# Altium footprint library PcbLib1.PcbLib: 24 footprints (part 1 of 2)
Each footprint in its own frame and in the unit in brackets; x right, y up, seen from the top. Pads: shape width x height; smd on the part's side, far side on the other; paste and mask are expansions set on the pad; w line width, h text height; cw(c..) or ccw(c..) is an arc to the next point about the centre after c.
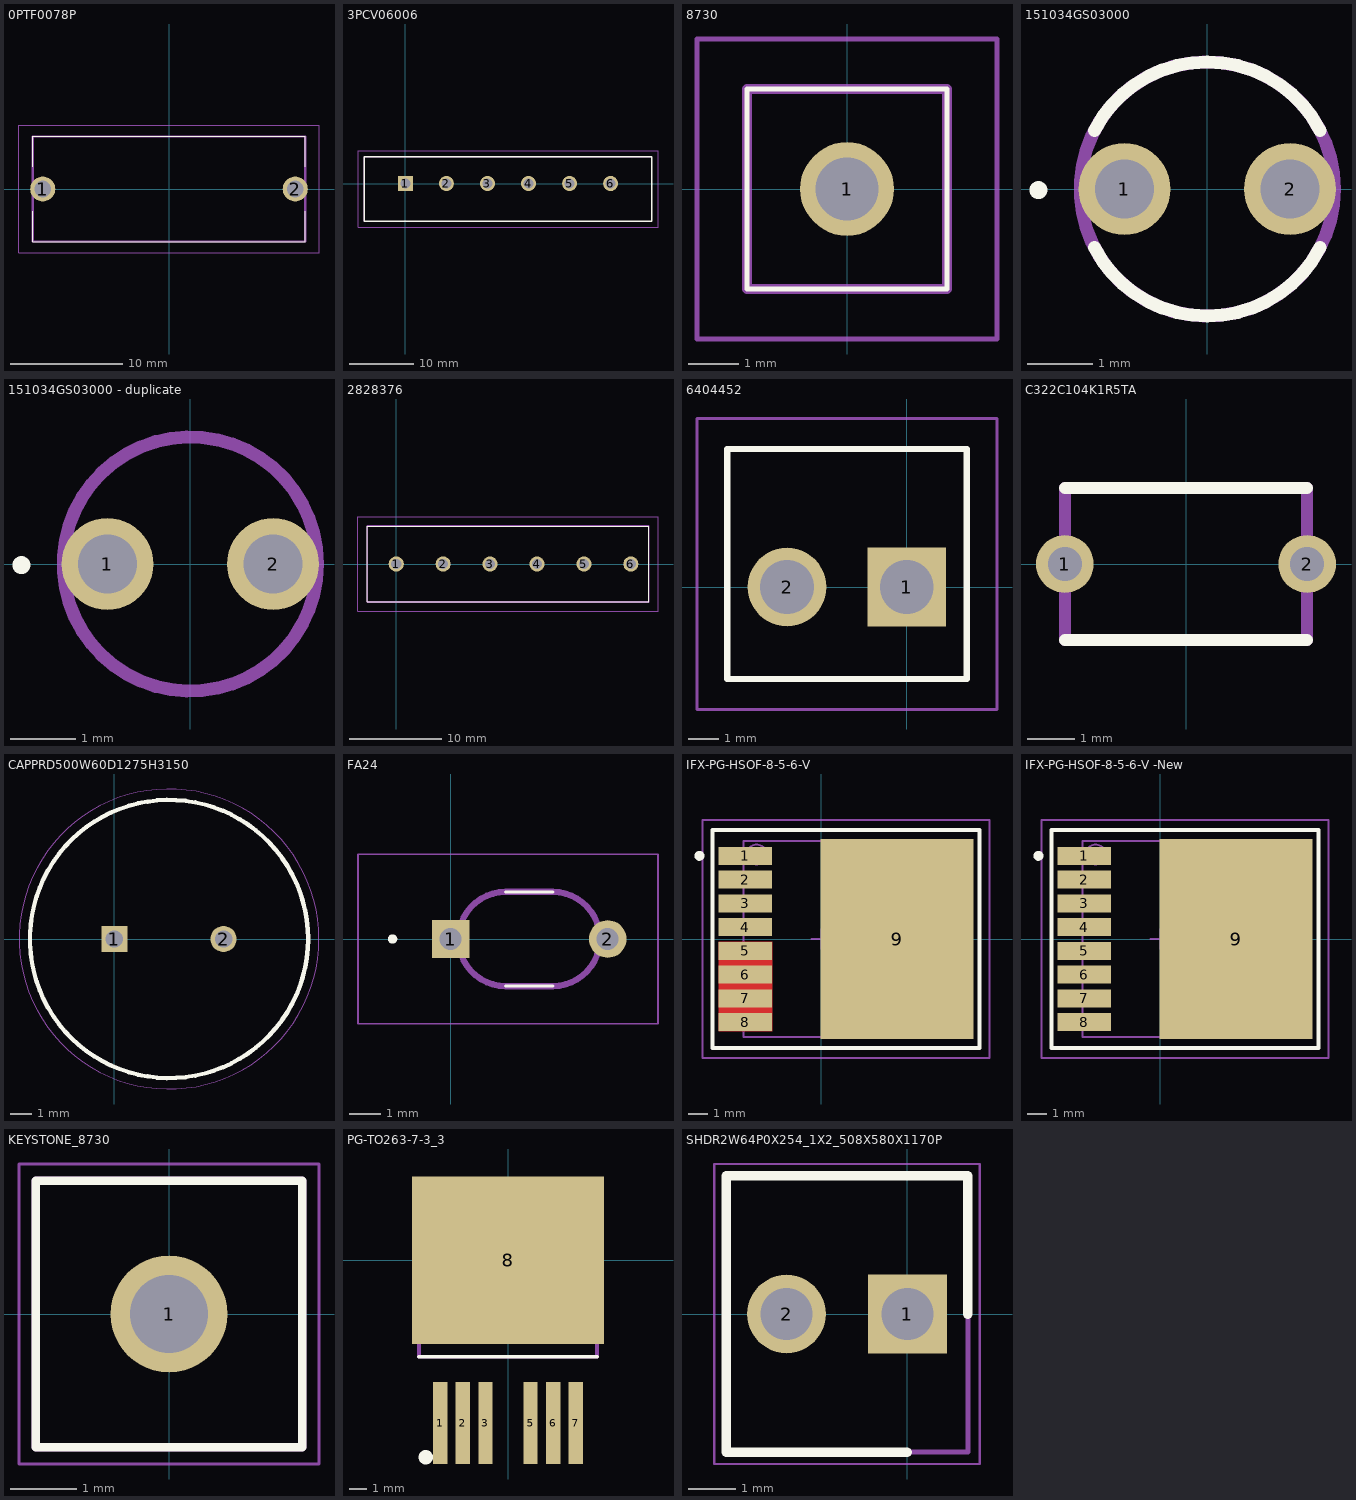
[diagram p0: the footprints below, top view; thin cyan lines are the x and y axes]

## 0PTF0078P [mm]
pads (2):
  round 2.25 hole 1.5: 1(-11.3,0) 2(11.3,0)
Top Overlay:
  lines w0.1: -12.2,-2 -12.2,-4.7 12.2,-4.7 12.2,-2 ; -12.2,2 -12.2,4.7 12.2,4.7 12.2,2
Mechanical 13:
  lines w0.2: -12.2,-4.7 -12.2,4.7 12.2,4.7 12.2,-4.7 -12.2,-4.7
Mechanical 15:
  lines w0.1: -13.425,-5.7 -13.425,5.7 13.425,5.7 13.425,-5.7 -13.425,-5.7
3D body "0PTF0078P.stp": height 11.45, standoff -3.55, extent -12.2,-4.7 12.2,4.7

## 3PCV06006 [mm]
pads (6):
  rect 2.34x2.34 hole 1.56: 1(0,0)
  round 2.34 hole 1.56: 2(6.35,0) 3(12.7,0) 4(19.05,0) 5(25.4,0) 6(31.75,0)
Top Overlay:
  lines w0.2: -6.325,-5.8 38.075,-5.8 38.075,4.1 -6.325,4.1 -6.325,-5.8
Mechanical 13:
  lines w0.1: -6.325,-5.8 38.075,-5.8 38.075,4.1 -6.325,4.1 -6.325,-5.8
Mechanical 15:
  lines w0.1: -7.325,-6.8 39.075,-6.8 39.075,5.1 -7.325,5.1 -7.325,-6.8
3D body "c-5-1437646-0-h-3d.stp": height 12.7, standoff -4.69, extent -3.81,-10.287 35.306,3.683

## 8730 [mm]
pads (1):
  round 1.875 hole 1.25: 1(0,0)
Top Overlay:
  lines w0.1: -2,-2 2,-2 2,2 -2,2 -2,-2
Mechanical 13:
  lines w0.2: -2,-2 2,-2 2,2 -2,2 -2,-2
Mechanical 15:
  lines w0.1: -3,-3 3,-3 3,3 -3,3 -3,-3
3D body "8730.stp": height 10.83, standoff -4.92, extent -2.002,-1.996 1.998,2.004

## 151034GS03000 [mm]
pads (2):
  round 1.41 hole 0.91: 1(-1.27,0) 2(1.27,0)
Top Overlay:
  circle w0.2: c-2.59,-0.017 r0.037
  lines w0.2: -1.73,-0.9 ccw(c0,0) 1.73,-0.9 ; -1.73,0.9 cw(c0,0) 1.73,0.9
Mechanical 13:
  circle w0.2: c0,0 r1.95
3D body "151031VS06000.stp": height 11.02, standoff -20.68, extent -1.961,-1.975 1.645,1.975

## 151034GS03000 - duplicate [mm]
pads (2):
  round 1.41 hole 0.91: 1(-1.27,0) 2(1.27,0)
Top Overlay:
  circle w0.2: c-2.59,-0.017 r0.037
Mechanical 13:
  circle w0.2: c0,0 r1.95
3D body "151031VS06000.stp": height 11.02, standoff -20.68, extent -1.961,-1.975 1.645,1.975

## 2828376 [mm]
pads (6):
  round 1.65 hole 1.1: 1(0,0) 2(5.08,0) 3(10.16,0) 4(15.24,0) 5(20.32,0) 6(25.4,0)
Top Overlay:
  lines w0.1: -3.14,-4.1 27.34,-4.1 27.34,4.1 -3.14,4.1 -3.14,-4.1
Mechanical 13:
  lines w0.2: -3.14,-4.1 27.34,-4.1 27.34,4.1 -3.14,4.1 -3.14,-4.1
Mechanical 15:
  lines w0.1: -4.14,-5.1 28.34,-5.1 28.34,5.1 -4.14,5.1 -4.14,-5.1
3D body "282837-6.stp": height 10.61, standoff -2.89, extent -3.18,-4.1 27.9,4.1

## 6404452 [mm]
pads (2):
  rect 2.6x2.6 hole 1.778: 1(0,0)
  round 2.6 hole 1.778: 2(-3.962,0)
Top Overlay:
  lines w0.2: -5.939,-3.048 -5.939,4.572 1.981,4.572 1.981,-3.048 -5.939,-3.048
Mechanical 13:
  lines w0.1: -5.939,-3.048 -5.939,4.572 1.981,4.572 1.981,-3.048 -5.939,-3.048
Mechanical 15:
  lines w0.1: -6.939,-4.048 -6.939,5.572 2.981,5.572 2.981,-4.048 -6.939,-4.048
3D body "640445-2.stp": height 13.38, standoff -3.13, extent -5.942,-3.045 1.982,4.575

## C322C104K1R5TA [mm]
pads (2):
  round 1.21 hole 0.71: 1(-2.54,0) 2(2.54,0)
Top Overlay:
  lines w0.254: -2.54,-1.59 2.54,-1.59 ; -2.54,1.59 2.54,1.59
Mechanical 13:
  lines w0.254: -2.54,-1.59 2.54,-1.59 2.54,1.59 -2.54,1.59 -2.54,-1.59
3D body "C322C104M5U5TA.stp": height 6.64, standoff -6.96, extent -2.793,-1.595 2.793,1.59

## CAPPRD500W60D1275H3150 [mm]
pads (2):
  rect 1.2x1.2 hole 0.8: 1(0,0)
  round 1.2 hole 0.8: 2(5,0)
Top Overlay:
  circle w0.2: c2.5,0 r6.375
Mechanical 13:
  circle w0.1: c2.5,0 r6.375
Mechanical 15:
  circle w0.05: c2.5,0 r6.875
3D body "EKZE630ELL471MK30S.stp": height 31.5, standoff -10, extent -4,-6.485 9,6.485

## FA24 [mm]
pads (2):
  rect 1.2x1.2 hole 0.7: 1(0,0)
  round 1.2 hole 0.7: 2(5,0)
Top Overlay:
  circle w0.2: c-1.85,0 r0.05
  lines w0.1: 1.75,-1.5 3.25,-1.5 ; 1.75,1.5 3.25,1.5
Mechanical 13:
  lines w0.2: 1.75,-1.5 cw(c1.75,0) 1.75,1.5 3.25,1.5 cw(c3.25,0) 3.25,-1.5 1.75,-1.5
Mechanical 15:
  lines w0.05: -2.95,-2.7 -2.95,2.7 6.6,2.7 6.6,-2.7 -2.95,-2.7
3D body "FA24X7R1H334KNU06.stp": height 5.96, standoff -6.54, extent -0.23,-1.5 5.27,1.5

## FUSE [mm]
3D body "MIDA.stp": height 4, standoff -4, extent 19.654,6.466 31.654,48.398

## IFX-PG-HSOF-8-5-6-V [mm] "PG-HSOF-8, SMD, 1.2 mm pitch, 9 pin, 10.375 mm L X 9.90 mm W X 2.30 mm H body"
height 2.3
pads (9):
  rect 2.7x0.9 smd paste-0.45 mask-0.05: 1(-3.827,4.2) 2(-3.827,3) 3(-3.827,1.8) 4(-3.827,0.6)
  rect 2.7x0.9 smd paste-1.3 mask-0.45: 5(-3.827,-0.6) 6(-3.827,-1.8) 7(-3.827,-3) 8(-3.827,-4.2)
  rect 7.743x10.1 smd paste-5.05 mask-5.05: 9(3.827,0)
Top Layer:
  region: -5.176,-0.15 -2.476,-0.15 -2.476,-4.65 -5.176,-4.65
Top Overlay:
  circle w0.25: c-6.15,4.2 r0.125
  lines w0.2: -5.5,-5.5 8,-5.5 8,5.5 -5.5,5.5 -5.5,-5.5
Top Paste:
  region: -5.079,-4.55 -5.077,-4.55 -2.579,-4.55 -2.579,-3.85 -5.079,-3.85
  region: -5.079,-0.95 -5.077,-0.95 -2.579,-0.95 -2.579,-0.25 -5.079,-0.25
  region: -5.079,-2.15 -5.077,-2.15 -2.579,-2.15 -2.579,-1.45 -5.079,-1.45
  region: -5.079,-3.35 -5.077,-3.35 -2.579,-3.35 -2.579,-2.65 -5.079,-2.65
  region: -2.877,0.95 -2.877,0.25 -5.077,0.25 -5.077,0.95
  region: -2.877,2.15 -2.877,1.45 -5.077,1.45 -5.077,2.15
  region: -2.877,3.35 -2.877,2.65 -5.077,2.65 -5.077,3.35
  region: -2.877,4.55 -2.877,3.85 -5.077,3.85 -5.077,4.55
  region: 7.528,4.25 7.528,0.25 6.328,0.25 6.328,4.25
  region: 7.528,-0.25 7.528,-4.25 6.328,-4.25 6.328,-0.25
  region: 6.028,3.67 6.028,0.25 4.828,0.25 4.828,3.67
  region: 4.528,3.67 4.528,0.25 3.328,0.25 3.328,3.67
  region: 3.028,4.25 3.028,0.25 1.828,0.25 1.828,4.25
  region: 1.528,4.25 1.528,0.25 0.328,0.25 0.328,4.25
  region: 6.028,-0.25 6.028,-3.67 4.828,-3.67 4.828,-0.25
  region: 4.528,-0.25 4.528,-3.67 3.328,-3.67 3.328,-0.25
  region: 3.028,-0.25 3.028,-4.25 1.828,-4.25 1.828,-0.25
  region: 1.528,-0.25 1.528,-4.25 0.328,-4.25 0.328,-0.25
Top Solder:
  region: 0.006,4.83 3.609,4.83 3.609,4.831 3.609,4.351 6.354,4.351 6.354,5.001 7.649,5.001 7.649,-5 6.354,-5 6.354,-4.35 3.609,-4.35 3.609,-4.83 0.006,-4.83
  region: -2.527,-0.2 -2.527,-4.6 -5.127,-4.6 -5.127,-3.8 -3.422,-3.8 -3.422,-3.4 -5.127,-3.4 -5.127,-2.6 -3.422,-2.6 -3.422,-2.2 -5.127,-2.2 -5.127,-1.4 -3.422,-1.4 -3.422,-1 -5.127,-1 -5.127,-0.2
Mechanical 3:
  text ".DESIGNATOR" at -3.643,-0.385 h1.2
Mechanical 13:
  circle w0.1: c-3.251,4.267 r0.5
  lines w0.1: -3.926,-4.95 6.449,-4.95 6.449,4.95 -3.926,4.95 -3.926,-4.95
Mechanical 15:
  lines w0.1: -0.5,0 0.5,0 ; 0,-0.5 0,0.5 ; -6,-6 8.5,-6 8.5,6 -6,6 -6,-6
3D body "PG-HSOF-8-(5-6).STEP": height 2.3, standoff 0, extent -4.576,-4.95 7.099,4.95

## IFX-PG-HSOF-8-5-6-V -New [mm] "PG-HSOF-8, SMD, 1.2 mm pitch, 9 pin, 10.375 mm L X 9.90 mm W X 2.30 mm H body"
height 2.3
pads (9):
  rect 2.7x0.9 smd paste-0.45 mask-0.05: 1(-3.827,4.2) 2(-3.827,3) 3(-3.827,1.8) 4(-3.827,0.6)
  rect 2.7x0.9 smd paste-1.3 mask-0.45: 5(-3.827,-0.6) 6(-3.827,-1.8) 7(-3.827,-3) 8(-3.827,-4.2)
  rect 7.743x10.1 smd paste-5.05 mask-5.05: 9(3.827,0)
Top Overlay:
  circle w0.25: c-6.15,4.2 r0.125
  lines w0.2: -5.5,-5.5 8,-5.5 8,5.5 -5.5,5.5 -5.5,-5.5
Top Paste:
  region: -5.079,-4.55 -5.077,-4.55 -2.579,-4.55 -2.579,-3.85 -5.079,-3.85
  region: -5.079,-0.95 -5.077,-0.95 -2.579,-0.95 -2.579,-0.25 -5.079,-0.25
  region: -5.079,-2.15 -5.077,-2.15 -2.579,-2.15 -2.579,-1.45 -5.079,-1.45
  region: -5.079,-3.35 -5.077,-3.35 -2.579,-3.35 -2.579,-2.65 -5.079,-2.65
  region: -2.877,0.95 -2.877,0.25 -5.077,0.25 -5.077,0.95
  region: -2.877,2.15 -2.877,1.45 -5.077,1.45 -5.077,2.15
  region: -2.877,3.35 -2.877,2.65 -5.077,2.65 -5.077,3.35
  region: -2.877,4.55 -2.877,3.85 -5.077,3.85 -5.077,4.55
  region: 7.528,4.25 7.528,0.25 6.328,0.25 6.328,4.25
  region: 7.528,-0.25 7.528,-4.25 6.328,-4.25 6.328,-0.25
  region: 6.028,3.67 6.028,0.25 4.828,0.25 4.828,3.67
  region: 4.528,3.67 4.528,0.25 3.328,0.25 3.328,3.67
  region: 3.028,4.25 3.028,0.25 1.828,0.25 1.828,4.25
  region: 1.528,4.25 1.528,0.25 0.328,0.25 0.328,4.25
  region: 6.028,-0.25 6.028,-3.67 4.828,-3.67 4.828,-0.25
  region: 4.528,-0.25 4.528,-3.67 3.328,-3.67 3.328,-0.25
  region: 3.028,-0.25 3.028,-4.25 1.828,-4.25 1.828,-0.25
  region: 1.528,-0.25 1.528,-4.25 0.328,-4.25 0.328,-0.25
Top Solder:
  region: 0.006,4.83 3.609,4.83 3.609,4.831 3.609,4.351 6.354,4.351 6.354,5.001 7.649,5.001 7.649,-5 6.354,-5 6.354,-4.35 3.609,-4.35 3.609,-4.83 0.006,-4.83
  region: -2.527,-0.2 -2.527,-4.6 -5.127,-4.6 -5.127,-3.8 -2.527,-3.8 -2.527,-3.4 -5.127,-3.4 -5.127,-2.6 -2.527,-2.6 -2.527,-2.2 -5.127,-2.2 -5.127,-1.4 -2.527,-1.4 -2.527,-1 -5.127,-1 -5.127,-0.2
Mechanical 3:
  text ".DESIGNATOR" at -3.643,-0.385 h1.2
Mechanical 13:
  circle w0.1: c-3.251,4.267 r0.5
  lines w0.1: -3.926,-4.95 6.449,-4.95 6.449,4.95 -3.926,4.95 -3.926,-4.95
Mechanical 15:
  lines w0.1: -0.5,0 0.5,0 ; 0,-0.5 0,0.5 ; -6,-6 8.5,-6 8.5,6 -6,6 -6,-6
3D body "PG-HSOF-8-(5-6).STEP": height 2.3, standoff 0, extent -4.576,-4.95 7.099,4.95

## KEYSTONE_8730 [mm]
height 6.25
pads (1):
  round 1.755 hole 1.17: 1(0,0)
Top Overlay:
  lines w0.127: -2,-2 2,-2 2,2 -2,2 -2,-2
Mechanical 13:
  lines w0.127: -2,-2 2,-2 2,2 -2,2 -2,-2
Mechanical 15:
  lines w0.05: -2.25,-2.25 2.25,-2.25 2.25,2.25 -2.25,2.25 -2.25,-2.25
3D body "step_temp.STEP": height 10.79, standoff -4.96, extent -1.965,-1.944 2.035,2.056

## PG-TO263-7-3_3 [mm]
pads (7):
  rect 0.8x4.6 smd: 1(-3.81,-9.15) 2(-2.54,-9.15) 3(-1.27,-9.15) 5(1.27,-9.15) 6(2.54,-9.15) 7(3.81,-9.15)
  rect 10.8x9.4 smd: 8(0,0)
Top Overlay:
  circle w0.4: c-4.616,-11.071 r0.204
  lines w0.2: -5,-5.425 5,-5.425
Mechanical 13:
  lines w0.2: -5,-5.425 -5,3.825 5,3.825 5,-5.425 -5,-5.425
3D body "BTS500101TAEATMA1.stp": height 4.4, standoff 0, extent -5,-10.845 5,4.105

## SHDR2W64P0X254_1X2_508X580X1170P [mm]
pads (2):
  rect 1.65x1.65 hole 1.1: 1(0,0)
  round 1.65 hole 1.1: 2(-2.54,0)
Top Overlay:
  lines w0.2: 0,-2.9 -3.81,-2.9 -3.81,2.9 1.27,2.9 1.27,0
Mechanical 13:
  lines w0.1: -3.81,-2.9 1.27,-2.9 1.27,2.9 -3.81,2.9 -3.81,-2.9
Mechanical 15:
  lines w0.05: -4.06,-3.15 1.52,-3.15 1.52,3.15 -4.06,3.15 -4.06,-3.15
3D body "0022272021.stp": height 11.62, standoff -3.64, extent -3.82,-2.9 1.26,2.9